# EAGLE library part IC_DIL8 (library dp_devices.v6)
Universal 8pins IC
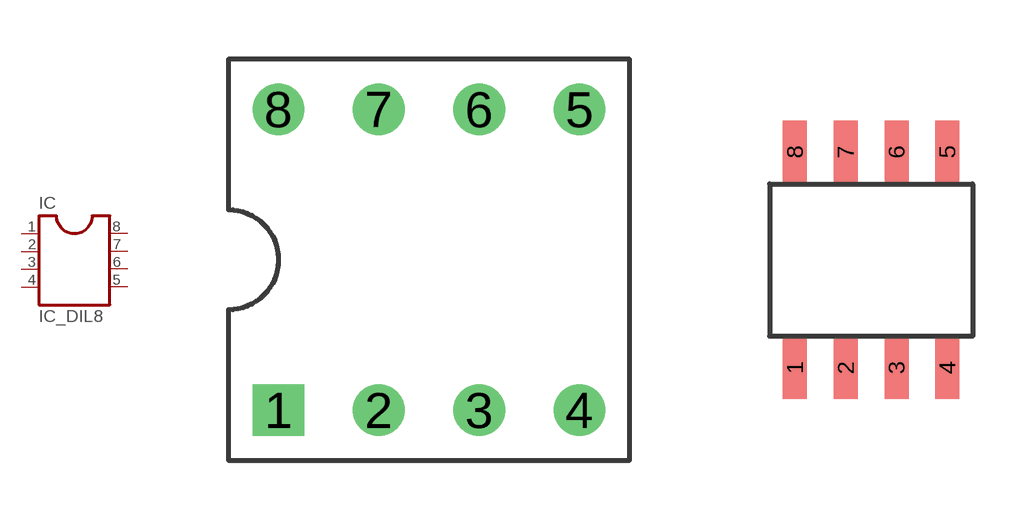
[diagram p37: symbol with the pads of DIP8; footprints DIP8, SO-8]

Designator prefix IC

## IC_DIL8-PTH  [DIP8]
1  1
2  2
3  3
4  4
5  5
6  6
7  7
8  8

## IC_DIL8-SOIC8  [SO-8]
Pads as for DIP8

## IC_DIL8-SOIC8W  [SOIC-8W]
Pads as for DIP8

## IC_DIL8-SOIC8NW  [SOIC-8NW]
P1  1
P2  2
P3  3
P4  4
P5  5
P6  6
P7  7
P8  8

## Footprint DIP8 (pad centres in mm)
drill 0.8 square: 1 -3.81,-3.81
drill 0.8: 2 -1.27,-3.81; 3 1.27,-3.81; 4 3.81,-3.81; 5 3.81,3.81; 6 1.27,3.81; 7 -1.27,3.81; 8 -3.81,3.81

## Footprint SO-8 (pad centres in mm)
smd 0.6 x 1.55: 1 -1.905,-2.69; 2 -0.635,-2.69; 3 0.635,-2.69; 4 1.905,-2.69; 5 1.905,2.71; 6 0.635,2.71; 7 -0.635,2.71; 8 -1.905,2.71

## Footprint SOIC-8W (pad centres in mm)
width: 208 mil (5.28 mm)
smd 0.6 x 2.2: 1 -1.905,-3.376; 2 -0.635,-3.376; 3 0.635,-3.376; 4 1.905,-3.376; 5 1.905,3.475; 6 0.635,3.475; 7 -0.635,3.475; 8 -1.905,3.475

## Footprint SOIC-8NW (pad centres in mm)
SSOP-14 Narrow - Wide Pad size: 0.6 x 3.56 mm Pad pitch: 1.27mm Pad pitch lateral: 7.56mm
smd 0.6 x 3.56: P1 -1.905,-3.78; P2 -0.635,-3.78; P3 0.635,-3.78; P4 1.905,-3.78; P5 1.905,3.78; P6 0.635,3.78; P7 -0.635,3.78; P8 -1.905,3.78